# Altium footprint library IRLZ44N.PcbLib: 17 footprints (part 1 of 2)
Each footprint in its own frame and in the unit in brackets; x right, y up, seen from the top. Pads: shape width x height; smd on the part's side, far side on the other; paste and mask are expansions set on the pad; w line width, h text height; cw(c..) or ccw(c..) is an arc to the next point about the centre after c.
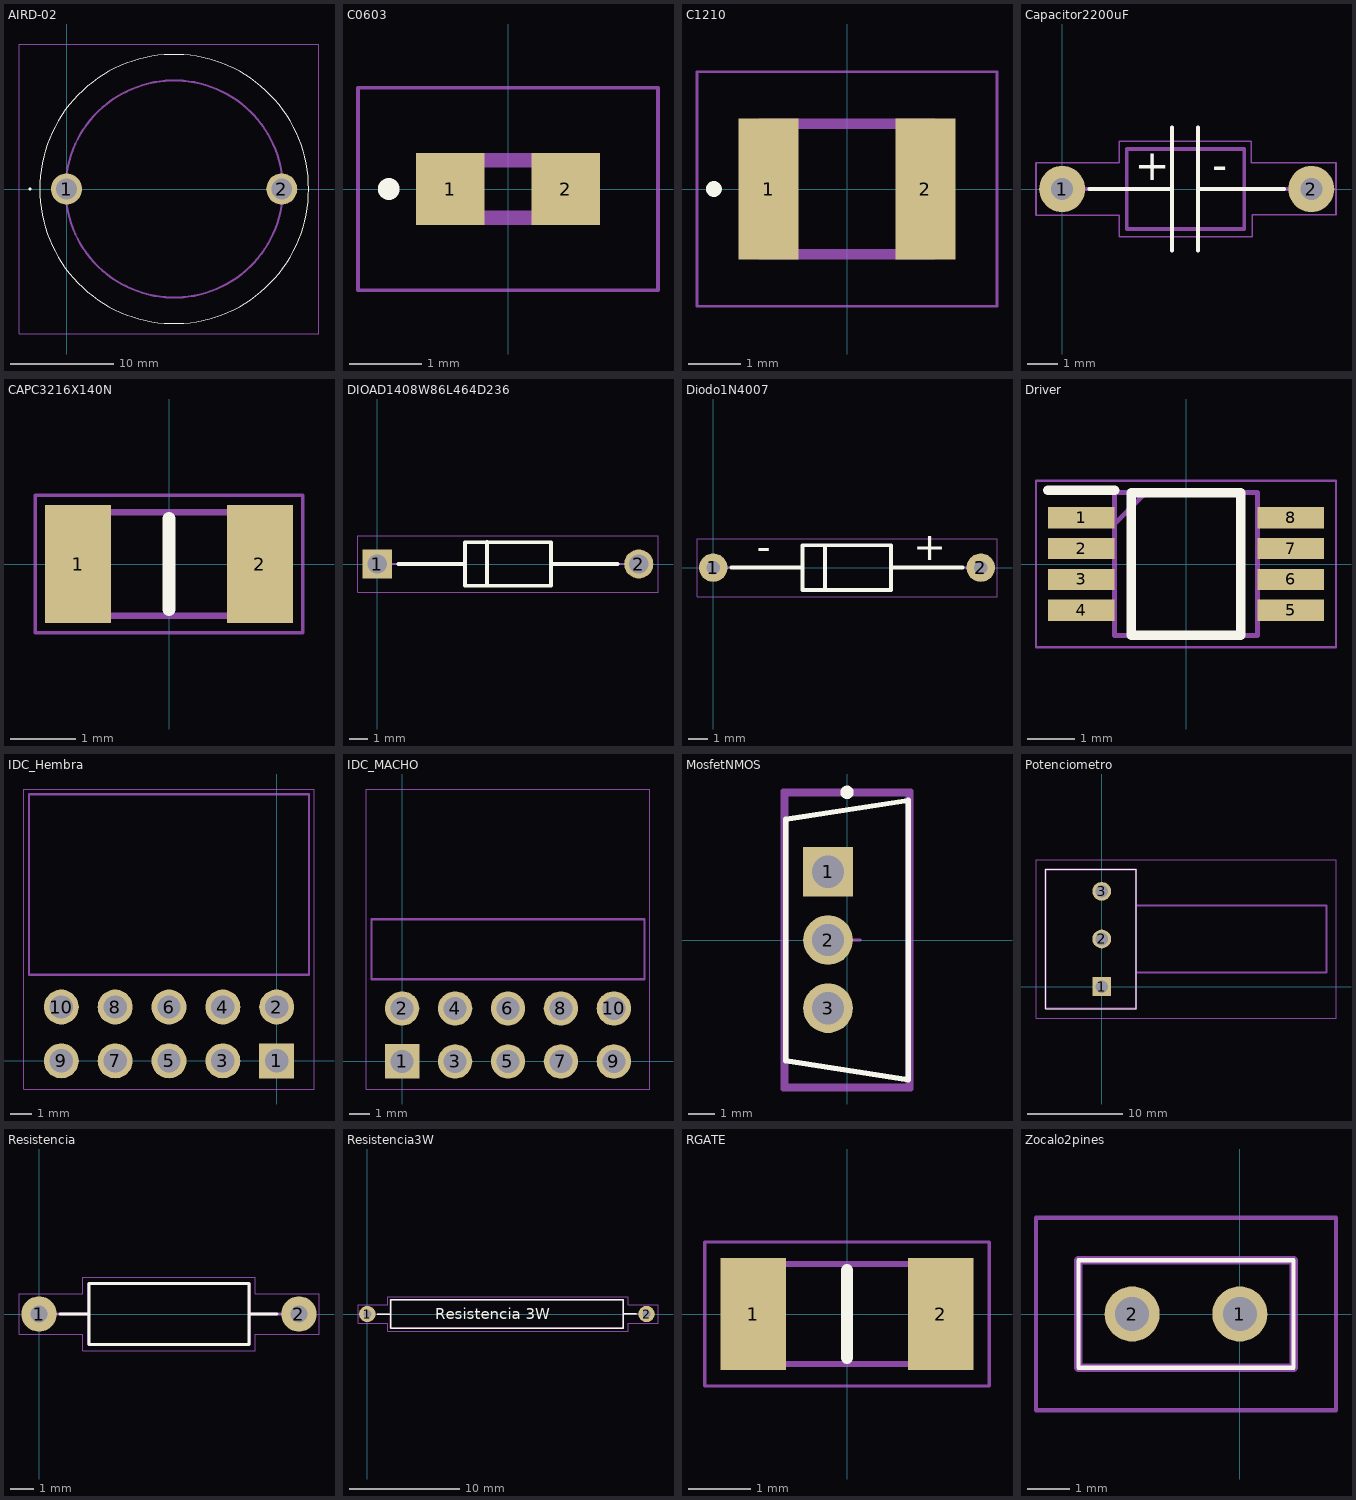
[diagram p0: the footprints below, top view; thin cyan lines are the x and y axes]

## AIRD-02 [mm]
pads (2):
  round 3 hole 2: 1(0,0) 2(20.8,0)
Top Overlay:
  lines w0.1: -2.6,0 ccw(c10.4,0) 23.4,0 ccw(c10.4,0) -2.6,0
  lines w0.2: -3.6,0 ccw(c-3.55,0) -3.5,0 ; -3.6,0 cw(c-3.55,0) -3.5,0 ; -3.6,0 ccw(c-3.55,0) -3.5,0
Top 3D Body:
  lines w0.2: -0.1,0 ccw(c10.4,0) 20.9,0 ccw(c10.4,0) -0.1,0
Top Courtyard:
  lines w0.1: -4.6,-14 24.4,-14 24.4,14 -4.6,14 -4.6,-14
3D body "1N5819.stp": height 2.72, standoff -2.72, extent 31.85,-1.778 46.789,0.922
3D body "AIRD-02-222K.stp": height 21.1, standoff -5, extent -0.9,-10.488 21.7,10.488

## C0603 [mm]
pads (2):
  rect 0.95x1 smd: 1(-0.8,0) 2(0.8,0)
Top Overlay:
  circle w0.2: c-1.65,0 r0.05
Top 3D Body:
  lines w0.2: -0.8,-0.4 -0.8,0.4 0.8,0.4 0.8,-0.4 -0.8,-0.4
Top Courtyard:
  lines w0.05: -2.075,-1.4 -2.075,1.4 2.075,1.4 2.075,-1.4 -2.075,-1.4
3D body "C0603X104M3RACTU.stp": height 0.87, standoff 0, extent -0.87,-0.48 0.88,0.47

## C1210 [mm]
pads (2):
  rect 1.15x2.7 smd: 1(-1.5,0) 2(1.5,0)
Top Overlay:
  circle w0.2: c-2.55,0 r0.05
Top 3D Body:
  lines w0.2: -1.65,-1.25 -1.65,1.25 1.65,1.25 1.65,-1.25 -1.65,-1.25
Top Courtyard:
  lines w0.05: -2.875,-2.25 -2.875,2.25 2.875,2.25 2.875,-2.25 -2.875,-2.25
3D body "C1210C106M3PACTU.stp": height 2.1, standoff 0, extent -1.8,-1.4 1.8,1.4

## Capacitor2200uF [mm]
height 2.6
pads (2):
  round 1.5 hole 0.711: 1(0,0) 2(8.1,0)
Top Overlay:
  lines w0.127: 0.889,0 3.531,0 ; 3.567,-2 3.567,2 ; 4.42,-2 4.419,2 ; 4.47,0 7.214,0
  text "-" at 4.877,0.288 h1
  text "+" at 2.362,0.291 h1
Top 3D Body:
  lines w0.127: 0.6,0 2.1,0 ; 5.918,0 7.493,0 ; 2.1,0 2.1,-1.3 5.918,-1.3 5.918,1.3 2.1,1.3 2.1,0
Top Courtyard:
  lines w0.05: -0.85,-0.85 1.85,-0.85 1.85,-1.55 6.172,-1.55 6.172,-0.838 8.902,-0.838 8.902,0.85 6.147,0.85 6.147,1.55 1.85,1.55 1.85,0.85 -0.85,0.85 -0.85,-0.85
3D body "2200uF 35V electr 16 x26mm -P.diameter 8mm-Black-White.stp": height 32, standoff 1.9, extent -3.936,-8.025 12.064,7.975
3D body "310-43-101-41-001000.stp": height 4.4, standoff -2.97, extent -1.27,-1.27 1.27,1.27
3D body "310-43-101-41-001000.stp": height 4.4, standoff -2.97, extent 6.833,-1.346 9.373,1.194

## CAPC3216X140N [mm]
pads (2):
  rect 1.02x1.82 smd: 1(-1.4,0) 2(1.4,0)
Top Overlay:
  lines w0.2: 0,-0.7 0,0.7
Top Courtyard:
  lines w0.1: -1.6,-0.8 -1.6,0.8 1.6,0.8 1.6,-0.8 -1.6,-0.8
Bottom Assembly (Mech20):
  lines w0.05: -2.06,-1.06 -2.06,1.06 2.06,1.06 2.06,-1.06 -2.06,-1.06
3D body "C1206C105K3RAC7800.stp": height 1.4, standoff 0, extent -1.827,-0.889 1.573,0.911

## DIOAD1408W86L464D236 [mm]
pads (2):
  rect 1.575x1.575 / inner round 1.575 / far side rect 1.575x1.575 hole 1.05: 1(0,0)
  round 1.575 hole 1.05: 2(14.1,0)
Top Overlay:
  lines w0.2: 1.138,0 4.732,0 ; 5.912,1.18 5.918,1.186 5.918,-1.18 ; 9.368,0 12.962,0 ; 4.732,-1.18 9.368,-1.18 9.368,1.18 4.732,1.18 4.732,-1.18
Top Courtyard:
  lines w0.1: 0,0 4.732,0 ; 5.912,1.18 5.918,1.186 5.918,-1.18 ; 9.368,0 14.1,0 ; 4.732,-1.18 9.367,-1.18 9.367,1.18 4.732,1.18 4.732,-1.18
Bottom Assembly (Mech20):
  lines w0.05: -1.038,-1.53 15.137,-1.53 15.137,1.53 -1.038,1.53 -1.038,-1.53
3D body "1N5819.stp": height 2.72, standoff -2.72, extent -0.432,-1.35 14.507,1.35

## Diodo1N4007 [mm]
pads (2):
  round 1.5 hole 0.711: 1(0,0) 2(14.1,0)
Top Overlay:
  lines w0.2: 0.95,0 4.699,0 ; 5.893,-1.175 5.893,1.168 5.9,1.175 ; 9.375,0 13.15,0 ; 4.699,-1.175 4.699,1.175 9.375,1.175 9.375,-1.175 4.699,-1.175
  text "+" at 10.541,0.381 h1.52
  text "-" at 2.286,0.381 h1.52
Top Courtyard:
  lines w0.1: 0,0 4.725,0 ; 5.893,-1.175 5.9,1.175 ; 9.375,0 14.1,0 ; 4.725,-1.175 9.375,-1.175 9.375,1.175 4.725,1.175 4.725,-1.175
Bottom Assembly (Mech20):
  lines w0.05: -0.85,-1.525 14.95,-1.525 14.95,1.525 -0.85,1.525 -0.85,-1.525
3D body "1N4007.stp": height 7.7, standoff 2.3, extent -0.29,-1.34 14.34,1.34
3D body "310-47-101-41-001000.stp": height 4.39, standoff -3, extent -1.27,-1.27 1.27,1.27
3D body "310-47-101-41-001000.stp": height 4.39, standoff -3, extent 12.83,-1.27 15.37,1.27

## Driver [mm]
pads (8):
  rect 1.4x0.45 smd: 1(-2.2,0.975) 2(-2.2,0.325) 3(-2.2,-0.325) 4(-2.2,-0.975) 5(2.2,-0.975) 6(2.2,-0.325) 7(2.2,0.325) 8(2.2,0.975)
Top Overlay:
  lines w0.2: -2.9,1.55 -1.5,1.55 ; -1.15,-1.5 1.15,-1.5 1.15,1.5 -1.15,1.5 -1.15,-1.5
Top Courtyard:
  lines w0.1: -1.5,0.85 -0.85,1.5 ; -1.5,-1.5 1.5,-1.5 1.5,1.5 -1.5,1.5 -1.5,-1.5
Bottom Assembly (Mech20):
  lines w0.05: -3.15,-1.75 3.15,-1.75 3.15,1.75 -3.15,1.75 -3.15,-1.75

## IDC_Hembra [mm]
pads (10):
  rect 1.65x1.65 / inner round 1.65 / far side rect 1.65x1.65 hole 1.1: 1(0,0)
  round 1.65 hole 1.1: 2(0,2.54) 3(-2.54,0) 4(-2.54,2.54) 5(-5.08,0) 6(-5.08,2.54) 7(-7.62,0) 8(-7.62,2.54) 9(-10.16,0) 10(-10.16,2.54)
Top Courtyard:
  lines w0.1: -11.685,4.06 1.525,4.06 1.525,12.57 -11.685,12.57 -11.685,4.06
Bottom Assembly (Mech20):
  lines w0.05: -11.935,-1.325 1.775,-1.325 1.775,12.82 -11.935,12.82 -11.935,-1.325
3D body "SSQ-105-02-T-D-RA.stp": height 4.95, standoff -2.54, extent -11.685,-0.33 1.525,12.56

## IDC_MACHO [mm]
pads (10):
  rect 1.65x1.65 / inner round 1.65 / far side rect 1.65x1.65 hole 1.1: 1(0,0)
  round 1.65 hole 1.1: 2(0,2.54) 3(2.54,0) 4(2.54,2.54) 5(5.08,0) 6(5.08,2.54) 7(7.62,0) 8(7.62,2.54) 9(10.16,0) 10(10.16,2.54)
Top Courtyard:
  lines w0.1: -1.46,3.94 11.621,3.94 11.621,6.821 -1.46,6.821 -1.46,3.94
Bottom Assembly (Mech20):
  lines w0.05: -1.71,-1.325 -1.71,13.071 11.871,13.071 11.871,-1.325 -1.71,-1.325
3D body "PH2RA-10-UA.stp": height 5.38, standoff -3.38, extent -1.46,-0.254 11.62,13.268

## MosfetNMOS [mm]
pads (3):
  rect 1.85x1.85 hole 1.2 paste-2539.97 mask+0: 1(-0.705,2.54)
  round 1.85 hole 1.2 paste-2539.97 mask+0: 2(-0.705,0) 3(-0.705,-2.54)
Top Overlay:
  circle w0.25: c0,5.5 r0.125
  lines w0.2: -2.275,-4.5 -2.275,4.5 2.275,5.2 2.275,-5.2 -2.275,-4.5
Top Assembly:
  lines w0.2: -2.375,-5.55 -2.375,5.55 2.375,5.55 2.375,-5.55 -2.375,-5.55
  text ".Designator" at 0,-0.001 h1
Top 3D Body:
  lines w0.2: -2.275,-5.45 -2.275,5.45 2.275,5.45 2.275,-5.45 -2.275,-5.45
Top Courtyard:
  lines w0.2: -2.375,-5.55 -2.375,5.55 2.375,5.55 2.375,-5.55 -2.375,-5.55
Top Component Center:
  lines w0.1: -0.5,0 0.5,0 ; 0,-0.5 0,0.5
3D body "TO-220-3 Bend Mirror.stp": height 4.41, standoff -3, extent -20.299,-5.942 -0.455,5.942

## Potenciometro [mm]
pads (3):
  rect 1.98x1.98 hole 1.32: 1(0,0)
  round 1.98 hole 1.32: 2(0,5) 3(0,10)
Top Overlay:
  lines w0.1: -5.9,-2.3 -5.9,12.3 -1.4,12.3 3.6,12.3 3.6,-2.3 -1.4,-2.3 -5.9,-2.3
Top 3D Body:
  lines w0.2: 3.6,1.5 23.6,1.5 23.6,8.5 3.6,8.5 ; -5.9,-2.3 3.6,-2.3 3.6,12.3 -5.9,12.3 -5.9,-2.3
Top Courtyard:
  lines w0.1: -6.9,-3.3 24.6,-3.3 24.6,13.3 -6.9,13.3 -6.9,-3.3
3D body "PDB181-K420K-502B.stp": height 21.2, standoff -3.8, extent -5.58,-3.5 18.92,13.494

## Resistencia [mm]
height 2.6
pads (2):
  round 1.5 hole 0.711: 1(0,0) 2(11,0)
Top Overlay:
  lines w0.127: 0.889,0 2.108,0 ; 8.89,0 10.08,0 ; 2.108,-1.295 2.108,0.457 2.108,1.295 8.89,1.295 8.89,-1.295 2.108,-1.295
Top 3D Body:
  lines w0.127: 0.6,0 2.1,0 ; 10.4,0 8.9,0 ; 2.1,0 2.1,-1.3 8.9,-1.3 8.9,0 ; 2.1,0 2.1,1.3 8.9,1.3 8.9,0
Top Courtyard:
  lines w0.05: -0.85,-0.85 -0.85,0.85 1.85,0.85 1.85,1.55 9.15,1.55 9.15,0.85 11.85,0.85 11.85,-0.85 9.15,-0.85 9.15,-1.55 1.85,-1.55 1.85,-0.85 -0.85,-0.85
3D body "step_temp.STEP": height 6.39, standoff -22.95, extent -0.263,-1.225 11.287,1.175
3D body "310-43-101-41-001000.stp": height 4.4, standoff -2.97, extent 9.73,-1.27 12.27,1.27
3D body "310-43-101-41-001000.stp": height 4.4, standoff -2.97, extent -1.27,-1.27 1.27,1.27

## Resistencia3W [mm]
height 2.6
pads (2):
  round 1.5 hole 0.711: 1(0,0) 2(25.4,0)
Top Overlay:
  lines w0.127: 0.889,0 2.108,0 ; 23.292,0.025 24.482,0.025 ; 2.108,-1.295 2.108,0.457 2.108,1.295 23.292,1.295 23.292,-1.295 2.108,-1.295
  text "Resistencia 3W" at 6.198,-0.457 h1
Top 3D Body:
  lines w0.127: 0.6,0 2.1,0 ; 23.306,0.025 24.79,0.025 ; 2.1,0 2.1,-1.3 23.292,-1.3 23.292,1.3 2.1,1.3 2.1,0
Top Courtyard:
  lines w0.05: 23.724,-1.55 1.85,-1.55 1.85,-0.85 -0.85,-0.85 -0.85,0.85 1.85,0.85 1.85,1.55 23.749,1.55 23.749,0.85 26.441,0.85 26.441,-0.85 23.749,-0.85 23.749,-1.55
3D body "310-43-101-41-001000.stp": height 4.4, standoff -2.97, extent 24.129,-1.27 26.669,1.27
3D body "310-43-101-41-001000.stp": height 4.4, standoff -2.97, extent -1.27,-1.27 1.27,1.27

## RGATE [mm]
pads (2):
  rect 1.05x1.8 smd: 1(-1.5,0) 2(1.5,0)
Top Overlay:
  lines w0.2: 0,-0.7 0,0.7
Top Courtyard:
  lines w0.1: -1.575,-0.8 -1.575,0.8 1.575,0.8 1.575,-0.8 -1.575,-0.8
Bottom Assembly (Mech20):
  lines w0.05: -2.275,-1.15 -2.275,1.15 2.275,1.15 2.275,-1.15 -2.275,-1.15
3D body "CRCW120610R0FKTC.stp": height 0.55, standoff 0, extent -1.7,-0.8 1.5,0.8

## Zocalo2pines [mm]
pads (2):
  round 1.3 hole 0.8: 1(0,0) 2(-2.54,0)
Top Overlay:
  lines w0.1: -3.81,-1.27 -3.81,1.27 1.27,1.27 1.27,-1.27 -3.81,-1.27
Top Courtyard:
  lines w0.2: -3.81,-1.27 -3.81,1.27 1.27,1.27 1.27,-1.27 -3.81,-1.27
Bottom Assembly (Mech20):
  lines w0.1: -4.81,-2.27 -4.81,2.27 2.27,2.27 2.27,-2.27 -4.81,-2.27
3D body "D01-9970242.stp": height 4.22, standoff -3.15, extent -3.81,-1.27 1.27,1.27